# Altium footprint library DT10966_MOTOR_CONTROLLER.PcbLib: 58 footprints (part 1 of 4)
Each footprint in its own frame and in the unit in brackets; x right, y up, seen from the top. Pads: shape width x height; smd on the part's side, far side on the other; paste and mask are expansions set on the pad; w line width, h text height; cw(c..) or ccw(c..) is an arc to the next point about the centre after c.
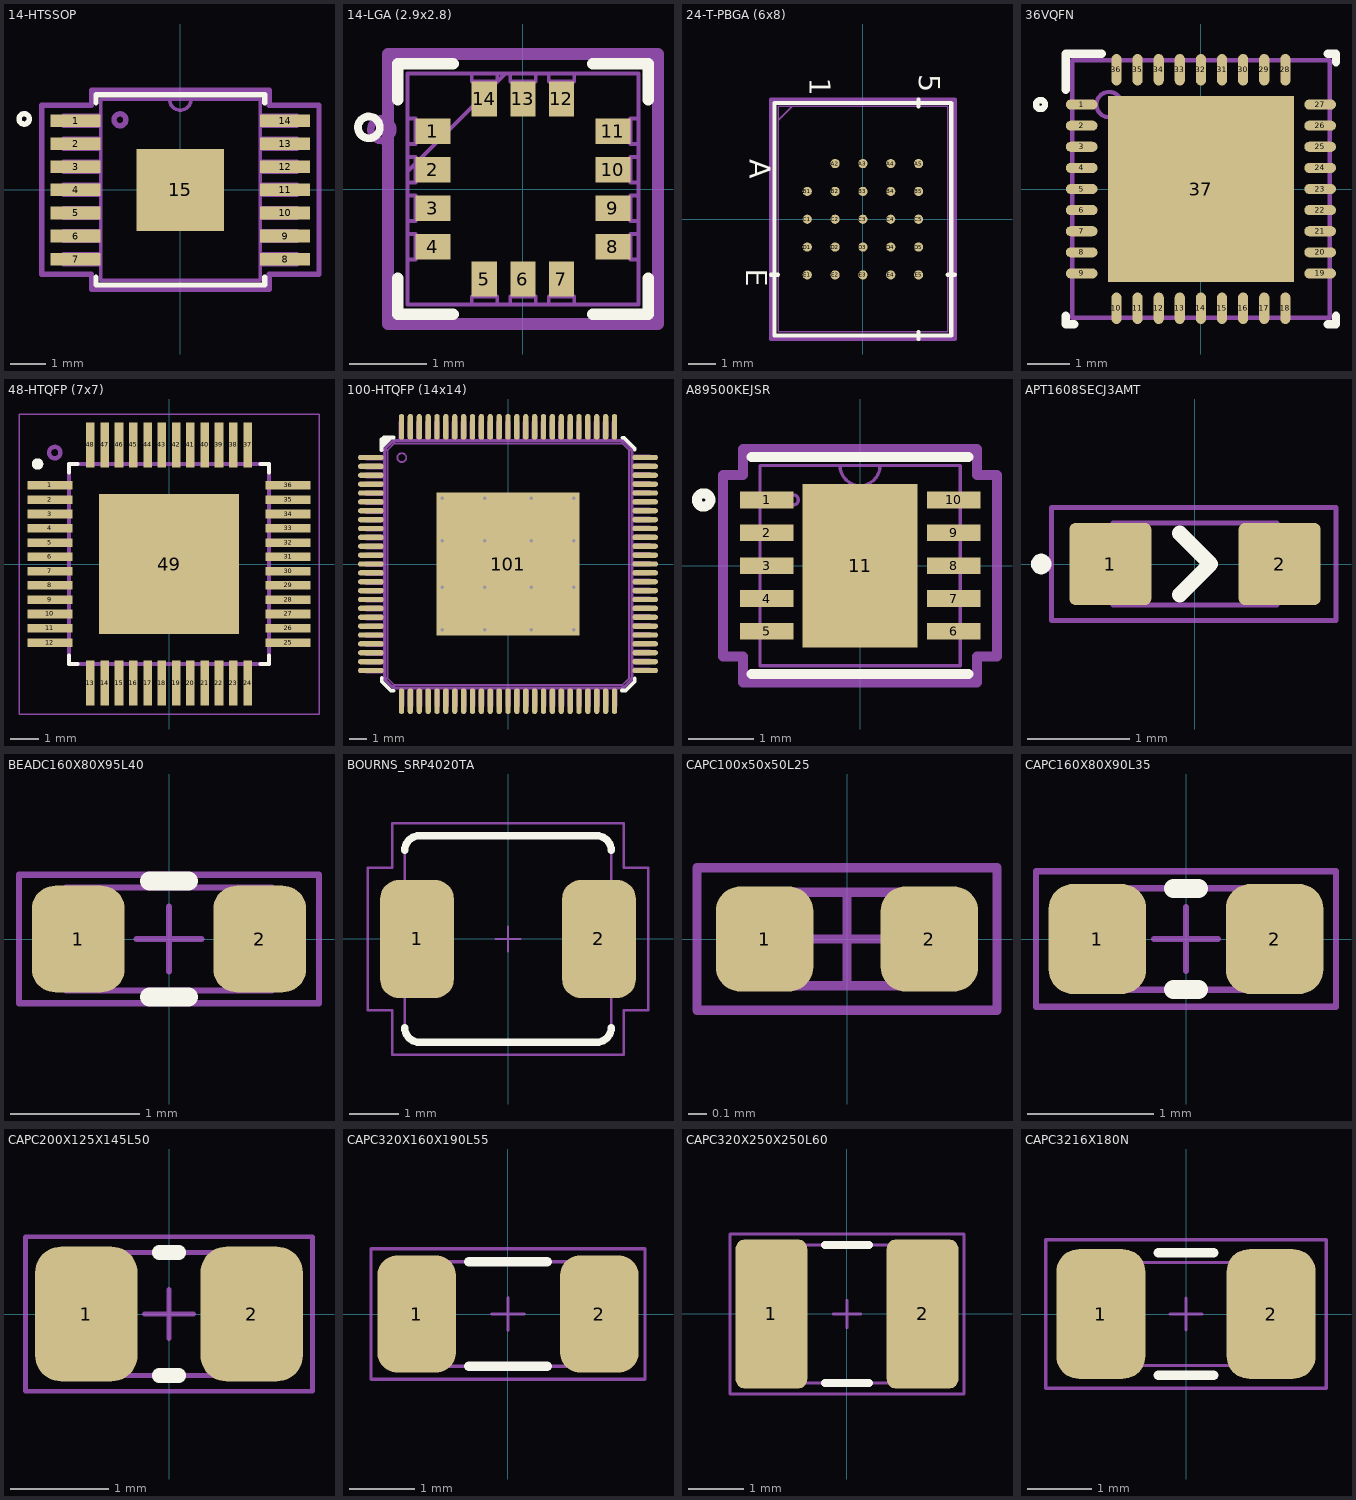
[diagram p0: the footprints below, top view; thin cyan lines are the x and y axes]

## 14-HTSSOP [mil]
pads (15):
  rect 55.42x14 smd paste+0 mask+1.97: 1(-116.21,76.77) 2(-116.21,51.18) 3(-116.21,25.59) 4(-116.21,0) 5(-116.21,-25.59) 6(-116.21,-51.18) 7(-116.21,-76.77) 8(116.21,-76.77) 9(116.21,-51.18) 10(116.21,-25.59) 11(116.21,0) 12(116.21,25.59) 13(116.21,51.18) 14(116.21,76.77)
  rect 97x91 smd paste+0 mask+1.97: 15(0,0)
Top Overlay:
  circle w5.91: c-173.23,78.74 r5.74
  lines w6: -93.5,-96.87 -93.5,-105.5 93.5,-105.5 93.5,-96.87 ; -93.5,96.87 -93.5,105.5 93.5,105.5 93.5,96.87
Top Assembly:
  circle w5.91: c-66.93,77.76 r6.6
  lines w3.94: -12,100.5 ccw(c0,100.5) 12,100.5 ; -129.92,-82.77 -88.5,-82.77 -88.5,-70.77 -129.92,-70.77 -129.92,-82.77 ; -129.92,-57.18 -88.5,-57.18 -88.5,-45.18 -129.92,-45.18 -129.92,-57.18 ; -129.92,-31.59 -88.5,-31.59 -88.5,-19.59 -129.92,-19.59 -129.92,-31.59 ; -129.92,-6 -88.5,-6 -88.5,6 -129.92,6 -129.92,-6 ; -129.92,19.59 -129.92,31.59 -88.5,31.59 -88.5,19.59 -129.92,19.59 ; -129.92,45.18 -88.5,45.18 -88.5,57.18 -129.92,57.18 -129.92,45.18 ; -129.92,70.77 -88.5,70.77 -88.5,82.77 -129.92,82.77 -129.92,70.77 ; -88.5,-100.5 88.5,-100.5 88.5,100.5 -88.5,100.5 -88.5,-100.5 ; 88.5,-82.77 129.92,-82.77 129.92,-70.77 88.5,-70.77 88.5,-82.77 ; 88.5,-57.18 129.92,-57.18 129.92,-45.18 88.5,-45.18 88.5,-57.18 ; 88.5,-31.59 129.92,-31.59 129.92,-19.59 88.5,-19.59 88.5,-31.59 ; 88.5,-6 129.92,-6 129.92,6 88.5,6 88.5,-6 ; 88.5,19.59 129.92,19.59 129.92,31.59 88.5,31.59 88.5,19.59 ; 88.5,45.18 129.92,45.18 129.92,57.18 88.5,57.18 88.5,45.18 ; 88.5,70.77 129.92,70.77 129.92,82.77 88.5,82.77 88.5,70.77
Top Courtyard:
  lines w6: -153.92,-93.77 -98.5,-93.77 -98.5,-110.5 98.5,-110.5 98.5,-93.77 153.92,-93.77 153.92,93.77 98.5,93.77 98.5,110.5 -98.5,110.5 -98.5,93.77 -153.92,93.77 -153.92,-93.77
3D body "ALM2403QPWPRQ1_TEX.step": height 47.09, standoff -2.01, extent -129.92,-100.51 129.92,100.51

## 14-LGA (2.9x2.8) [mil] "ADXL382-2BCCZ-RL7"
height 21.65
pads (14):
  rect 18x13 smd paste+0 mask+0: 1(-46,29.53) 2(-46,9.84) 3(-46,-9.84) 4(-46,-29.53) 8(46,-29.53) 9(46,-9.84) 10(46,9.84) 11(46,29.53)
  rect 13x18 smd paste+0 mask+0: 5(-19.68,-46) 6(0,-46) 7(19.68,-46) 12(19.68,46) 13(0,46) 14(-19.68,46)
Top Overlay:
  circle w3.94: c-78.74,31.5 r5.57
  lines w6: -64,-45.55 -64,-64 -35.7,-64 ; -64,45.55 -64,64 -35.7,64 ; 35.7,-64 64,-64 64,-45.55 ; 35.7,64 64,64 64,45.55
Top Solder:
  rectangle: -56.75,-38.24 -35.04,38.33
  region: 56.75,38.17 35.04,38.17 35.04,-38.24 56.75,-38.24
  rectangle: -28.58,35.12 28.63,56.95
  rectangle: -28.58,-56.95 28.63,-35.12
Top Assembly:
  circle w3.94: c-72.2,30.38 r5.57
  lines w1.97: -59,9 -9,59 ; -59,-59 -59,59 59,59 59,-59 -59,-59 ; -59,-36.03 -55,-36.03 -55,-23.03 -59,-23.03 -59,-36.03 ; -59,-16.34 -55,-16.34 -55,-3.34 -59,-3.34 -59,-16.34 ; -59,3.34 -55,3.34 -55,16.34 -59,16.34 -59,3.34 ; -59,23.03 -55,23.03 -55,36.03 -59,36.03 -59,23.03 ; -26.18,-59 -13.19,-59 -13.19,-55 -26.18,-55 -26.18,-59 ; -26.18,55 -13.19,55 -13.19,59 -26.18,59 -26.18,55 ; -6.5,-59 6.5,-59 6.5,-55 -6.5,-55 -6.5,-59 ; -6.5,55 6.5,55 6.5,59 -6.5,59 -6.5,55 ; 13.19,-59 26.18,-59 26.18,-55 13.19,-55 13.19,-59 ; 13.19,55 26.18,55 26.18,59 13.19,59 13.19,55 ; 55,-36.03 59,-36.03 59,-23.03 55,-23.03 55,-36.03 ; 55,-16.34 59,-16.34 59,-3.34 55,-3.34 55,-16.34 ; 55,3.34 59,3.34 59,16.34 55,16.34 55,3.34 ; 55,23.03 59,23.03 59,36.03 55,36.03 55,23.03
  text "'.Designator'" at -145.67,74.26 h60
Top Courtyard:
  lines w6: -69,-69 -69,-46.03 -69,46.03 -69,69 -36.19,69 36.19,69 69,69 69,46.03 69,-46.03 69,-69 36.19,-69 -36.19,-69 -69,-69
3D body "CC-14-3_ADI.step": height 38.11, standoff 0, extent -59.02,-59.02 59.02,59.02

## 24-T-PBGA (6x8) [mil]
height 21.65
pads (24):
  round 13 smd paste+0 mask+1.97: A2(-39.37,78.74) A3(0,78.74) A4(39.37,78.74) A5(78.74,78.74) B1(-78.74,39.37) B2(-39.37,39.37) B3(0,39.37) B4(39.37,39.37) B5(78.74,39.37) C1(-78.74,0) C2(-39.37,0) C3(0,0) C4(39.37,0) C5(78.74,0) D1(-78.74,-39.37) D2(-39.37,-39.37) D3(0,-39.37) D4(39.37,-39.37) D5(78.74,-39.37) E1(-78.74,-78.74) E2(-39.37,-78.74) E3(0,-78.74) E4(39.37,-78.74) E5(78.74,-78.74)
Top Overlay:
  lines w6: -130,-78.74 -120,-78.74 ; 78.74,-169.5 78.74,-159.5 ; 78.74,159.5 78.74,169.5 ; 120,-78.74 130,-78.74 ; -125,-164.5 -125,164.5 125,164.5 125,-164.5 -125,-164.5
  text "5" at 70,205 h50
  text "1" at -85,200 h50
  text "E" at -175,-70 h50
  text "A" at -170,85 h50
Top Assembly:
  lines w1.97: -120,139.81 -100.31,159.5 ; -120,-159.5 -120,159.5 120,159.5 120,-159.5 -120,-159.5
  text "'.Designator'" at -145.67,11.27 h60
  text "5" at 103.74,184.5 h50
  text "1" at -53.74,184.5 h50
  text "E" at -170,-103.74 h50
  text "A" at -170,53.74 h50
Top Courtyard:
  lines w6: -130,-169.5 130,-169.5 130,169.5 -130,169.5 -130,-169.5
3D body "BGA24_MT25QL_MRN.step": height 47.09, standoff -0.01, extent -120,-159.49 120,159.49

## 36VQFN [mm] "PGA900ARHHR"
height 0.55
pads (37):
  oval 0.75x0.24 smd paste+0 mask+0.051: 1(-2.825,2) 2(-2.825,1.5) 3(-2.825,1) 4(-2.825,0.5) 5(-2.825,0) 6(-2.825,-0.5) 7(-2.825,-1) 8(-2.825,-1.5) 9(-2.825,-2) 19(2.825,-2) 20(2.825,-1.5) 21(2.825,-1) 22(2.825,-0.5) 23(2.825,0) 24(2.825,0.5) 25(2.825,1) 26(2.825,1.5) 27(2.825,2)
  oval 0.24x0.75 smd paste+0 mask+0.051: 10(-2,-2.825) 11(-1.5,-2.825) 12(-1,-2.825) 13(-0.5,-2.825) 14(0,-2.825) 15(0.5,-2.825) 16(1,-2.825) 17(1.5,-2.825) 18(2,-2.825) 28(2,2.825) 29(1.5,2.825) 30(1,2.825) 31(0.5,2.825) 32(0,2.825) 33(-0.5,2.825) 34(-1,2.825) 35(-1.5,2.825) 36(-2,2.825)
  rect 4.4x4.4 smd paste-2.187 mask+0.051: 37(0,0)
Top Overlay:
  circle w0.15: c-3.8,2 r0.107
  lines w0.2: -3.2,-3 -3.2,-3.2 -3,-3.2 ; -3.2,2.35 -3.2,3.2 -2.35,3.2 ; 3,-3.2 3.2,-3.2 3.2,-3 ; 3,3.2 3.2,3.2 3.2,3
Top Paste:
  region: 0.1,1.946 0.1,0.1 1.946,0.1 1.946,1.946
  region: -0.1,0.1 -0.1,1.946 -1.946,1.946 -1.946,0.1
  region: -0.1,-1.946 -0.1,-0.1 -1.946,-0.1 -1.946,-1.946
  region: 0.1,-0.1 0.1,-1.946 1.946,-1.946 1.946,-0.1
Top Assembly:
  circle w0.1: c-2.175,2 r0.3
  lines w0.1: -3.05,-3.05 3.05,-3.05 3.05,3.05 -3.05,3.05 -3.05,-3.05
  text "'.Designator'" at -3.7,3.386 h1.52
3D body "RHH0036C.stp": height 1, standoff 0, extent -3,-3 3,3

## 48-HTQFP (7x7) [mm]
pads (49):
  rect 1.57x0.3 smd: 1(-4.17,2.75) 2(-4.17,2.25) 3(-4.17,1.75) 4(-4.17,1.25) 5(-4.17,0.75) 6(-4.17,0.25) 7(-4.17,-0.25) 8(-4.17,-0.75) 9(-4.17,-1.25) 10(-4.17,-1.75) 11(-4.17,-2.25) 12(-4.17,-2.75) 25(4.17,-2.75) 26(4.17,-2.25) 27(4.17,-1.75) 28(4.17,-1.25) 29(4.17,-0.75) 30(4.17,-0.25) 31(4.17,0.25) 32(4.17,0.75) 33(4.17,1.25) 34(4.17,1.75) 35(4.17,2.25) 36(4.17,2.75)
  rect 0.3x1.57 smd: 13(-2.75,-4.17) 14(-2.25,-4.17) 15(-1.75,-4.17) 16(-1.25,-4.17) 17(-0.75,-4.17) 18(-0.25,-4.17) 19(0.25,-4.17) 20(0.75,-4.17) 21(1.25,-4.17) 22(1.75,-4.17) 23(2.25,-4.17) 24(2.75,-4.17) 37(2.75,4.17) 38(2.25,4.17) 39(1.75,4.17) 40(1.25,4.17) 41(0.75,4.17) 42(0.25,4.17) 43(-0.25,4.17) 44(-0.75,4.17) 45(-1.25,4.17) 46(-1.75,4.17) 47(-2.25,4.17) 48(-2.75,4.17)
  rect 4.902x4.902 smd paste-5 mask+0.05: 49(0,0)
Top Overlay:
  circle w0.2: c-4.6,3.5 r0.1
  lines w0.127: -3.5,-3.2 -3.5,-3.5 -3.2,-3.5 ; -3.5,3.2 -3.5,3.5 -3.2,3.5 ; 3.2,-3.5 3.5,-3.5 3.5,-3.2 ; 3.2,3.5 3.5,3.5 3.5,3.2
Top Paste:
  region: 0.101,0.101 0.101,2.45 2.45,2.45 2.45,0.101
  region: 0.101,-0.101 2.45,-0.101 2.45,-2.45 0.101,-2.45
  region: -0.101,-0.101 -0.101,-2.45 -2.45,-2.45 -2.45,-0.101
  region: -0.101,0.101 -2.45,0.101 -2.45,2.45 -0.101,2.45
Top Assembly:
  circle w0.15: c-4,3.9 r0.2
  lines w0.127: -3.5,-3.5 -3.5,3.5 3.5,3.5 3.5,-3.5 -3.5,-3.5
  text "'.Designator'" at -3.4,2.286 h1.52
Top Courtyard:
  lines w0.05: -5.25,-5.25 -5.25,5.25 5.25,5.25 5.25,-5.25 -5.25,-5.25
3D body "TUSB8020BIPHPR.STEP": height 1.2, standoff 0, extent -4.5,-4.5 4.5,4.5

## 100-HTQFP (14x14) [mm]
height 0.55
pads (101):
  oval 1.45x0.3 smd paste+0 mask+0.051: 1(-7.725,6) 2(-7.725,5.5) 3(-7.725,5) 4(-7.725,4.5) 5(-7.725,4) 6(-7.725,3.5) 7(-7.725,3) 8(-7.725,2.5) 9(-7.725,2) 10(-7.725,1.5) 11(-7.725,1) 12(-7.725,0.5) 13(-7.725,0) 14(-7.725,-0.5) 15(-7.725,-1) 16(-7.725,-1.5) 17(-7.725,-2) 18(-7.725,-2.5) 19(-7.725,-3) 20(-7.725,-3.5) 21(-7.725,-4) 22(-7.725,-4.5) 23(-7.725,-5) 24(-7.725,-5.5) 25(-7.725,-6) 51(7.725,-6) 52(7.725,-5.5) 53(7.725,-5) 54(7.725,-4.5) 55(7.725,-4) 56(7.725,-3.5) 57(7.725,-3) 58(7.725,-2.5) 59(7.725,-2) 60(7.725,-1.5) 61(7.725,-1) 62(7.725,-0.5) 63(7.725,0) 64(7.725,0.5) 65(7.725,1) 66(7.725,1.5) 67(7.725,2) 68(7.725,2.5) 69(7.725,3) 70(7.725,3.5) 71(7.725,4) 72(7.725,4.5) 73(7.725,5) 74(7.725,5.5) 75(7.725,6)
  oval 0.3x1.45 smd paste+0 mask+0.051: 26(-6,-7.725) 27(-5.5,-7.725) 28(-5,-7.725) 29(-4.5,-7.725) 30(-4,-7.725) 31(-3.5,-7.725) 32(-3,-7.725) 33(-2.5,-7.725) 34(-2,-7.725) 35(-1.5,-7.725) 36(-1,-7.725) 37(-0.5,-7.725) 38(0,-7.725) 39(0.5,-7.725) 40(1,-7.725) 41(1.5,-7.725) 42(2,-7.725) 43(2.5,-7.725) 44(3,-7.725) 45(3.5,-7.725) 46(4,-7.725) 47(4.5,-7.725) 48(5,-7.725) 49(5.5,-7.725) 50(6,-7.725) 76(6,7.725) 77(5.5,7.725) 78(5,7.725) 79(4.5,7.725) 80(4,7.725) 81(3.5,7.725) 82(3,7.725) 83(2.5,7.725) 84(2,7.725) 85(1.5,7.725) 86(1,7.725) 87(0.5,7.725) 88(0,7.725) 89(-0.5,7.725) 90(-1,7.725) 91(-1.5,7.725) 92(-2,7.725) 93(-2.5,7.725) 94(-3,7.725) 95(-3.5,7.725) 96(-4,7.725) 97(-4.5,7.725) 98(-5,7.725) 99(-5.5,7.725) 100(-6,7.725)
  rect 8.045x8.045 smd paste-10 mask+0.051: 101(0,0)
via 3.7,-3.7 diameter 0.4 hole 0.2
via 1.3,-3.7 diameter 0.4 hole 0.2
via -1.3,-3.7 diameter 0.4 hole 0.2
via -3.7,-3.7 diameter 0.4 hole 0.2
via 3.7,-1.3 diameter 0.4 hole 0.2
via 1.3,-1.3 diameter 0.4 hole 0.2
via -1.3,-1.3 diameter 0.4 hole 0.2
via -3.7,-1.3 diameter 0.4 hole 0.2
via -3.7,1.3 diameter 0.4 hole 0.2
via -1.3,1.3 diameter 0.4 hole 0.2
via 1.3,1.3 diameter 0.4 hole 0.2
via 3.7,1.3 diameter 0.4 hole 0.2
via 3.7,3.7 diameter 0.4 hole 0.2
via 1.3,3.7 diameter 0.4 hole 0.2
via -1.3,3.7 diameter 0.4 hole 0.2
via -3.7,3.7 diameter 0.4 hole 0.2
Top Overlay:
  lines w0.2: -7.125,6.4 -7.125,6.575 -6.6,7.1 ; -7.125,6.525 -7.125,6.8 -6.8,7.125 ; -7.125,6.675 -7.125,6.925 -7.125,7.025 -7,7.125 -6.8,7.125 ; -7.1,-6.625 -6.575,-7.15 -6.425,-7.15 ; -7.1,-6.6 -7.1,-6.4 ; -6.575,7.1 -6.425,7.1 ; -6.45,7.125 -6.8,7.125 ; 6.4,-7.125 6.6,-7.125 ; 6.425,7.1 6.55,7.1 7.15,6.5 7.15,6.425 ; 6.625,-7.125 7.15,-6.6 7.15,-6.425
Top Paste:
  region: -1.9,-0.2 -0.2,-0.2 -0.2,-1.9 -1.9,-1.9
  region: -1.9,1.9 -0.2,1.9 -0.2,0.2 -1.9,0.2
  region: 0.2,-0.2 1.9,-0.2 1.9,-1.9 0.2,-1.9
  region: 0.2,1.9 1.9,1.9 1.9,0.2 0.2,0.2
  region: 2.3,-0.2 4,-0.2 4,-1.9 2.3,-1.9
  region: 2.3,1.9 4,1.9 4,0.2 2.3,0.2
  region: 2.3,-4 2.3,-2.3 4,-2.3 4,-4
  region: 0.2,-4 0.2,-2.3 1.9,-2.3 1.9,-4
  region: -1.9,-4 -1.9,-2.3 -0.2,-2.3 -0.2,-4
  region: 2.3,2.3 2.3,4 4,4 4,2.3
  region: 0.2,2.3 0.2,4 1.9,4 1.9,2.3
  region: -1.9,2.3 -1.9,4 -0.2,4 -0.2,2.3
  region: -4,-2.3 -2.3,-2.3 -2.3,-4 -4,-4
  region: -4,-0.2 -2.3,-0.2 -2.3,-1.9 -4,-1.9
  region: -4,1.9 -2.3,1.9 -2.3,0.2 -4,0.2
  region: -4,4 -2.3,4 -2.3,2.3 -4,2.3
Top Assembly:
  drawing of 2400 lines, arcs and shapes, not listed
  text "'.Designator'" at -3.7,-0.214 h1.52
3D body "PZP0100N.stp": height 1.1, standoff 0, extent -8.015,-8.015 8.015,8.015

## A89500KEJSR [mil]
height 21.65
pads (11):
  rect 32x10 smd paste+0 mask+0: 1(-56,39.37) 2(-56,19.68) 3(-56,0) 4(-56,-19.68) 5(-56,-39.37) 6(56,-39.37) 7(56,-19.68) 8(56,0) 9(56,19.68) 10(56,39.37)
  rect 69x98 smd paste+0 mask+0: 11(0,0)
Top Overlay:
  circle w6: c-93.69,39.37 r4
  lines w6: -65,-65 65,-65 ; -65,65 65,65
Top Solder:
  rectangle: -35.94,-50.98 36.52,50.79
  region: 73.98,-32.35 30,-32.35 30,-46.21 73.98,-46.21
  region: 73.98,-12.67 30,-12.67 30,-26.53 73.98,-26.53
  region: 73.98,7.02 30,7.02 30,-6.84 73.98,-6.84
  region: 73.98,26.7 30,26.7 30,12.84 73.98,12.84
  region: 73.98,46.39 30,46.39 30,32.53 73.98,32.53
  rectangle: -73.98,-46.21 -30,-32.35
  rectangle: -73.98,-26.53 -30,-12.67
  rectangle: -73.98,-6.84 -30,7.02
  rectangle: -73.98,12.84 -30,26.7
  rectangle: -73.98,32.53 -30,46.39
Top Assembly:
  circle w1.97: c-40,39.37 r3
  lines w1.97: -12,60 ccw(c0,60) 12,60 ; -60,-60 60,-60 60,60 -60,60 -60,-60
  text "'.Designator'" at -145.67,11.27 h60
Top Courtyard:
  lines w6: -82,-54.37 -82,54.37 -70,54.37 -70,70 70,70 70,54.37 82,54.37 82,-54.37 70,-54.37 70,-70 -70,-70 -70,-54.37 -82,-54.37
3D body "SON10_A89500GEJTR-T_ALM.step": height 32.09, standoff 0, extent -60,-60 60,60

## APT1608SECJ3AMT [mm]
height 0.55
pads (2):
  rrect15% 0.8x0.8 smd: 1(-0.825,0) 2(0.825,0)
Top Overlay:
  circle w0.1: c-1.5,0 r0.05
  lines w0.1: 0.175,0 0.175,0
  lines w0.15: -0.15,-0.3 0.15,0 -0.15,0.3
Top Assembly:
  lines w0.05: -0.8,-0.4 -0.8,0.4 0.8,0.4 0.8,-0.4 -0.8,-0.4
  text "'.Designator'" at -2.317,0.613 h1
Top Courtyard:
  lines w0.05: -1.4,-0.55 -1.4,0.55 1.375,0.55 1.375,-0.55 -1.4,-0.55
3D body "APT1608SEC_J3-AMT.stp": height 0.75, standoff 0, extent -0.801,-0.4 0.81,0.4

## BEADC160X80X95L40 [mm] "EIA 0603 (1608) 1.60x0.80x0.95 Ferrite Bead"
height 0.95
pads (2):
  rrect50% 0.72x0.83 smd: 1(-0.705,0) 2(0.705,0)
Top Overlay:
  lines w0.15: -0.15,-0.45 0.15,-0.45 ; -0.15,0.45 0.15,0.45
Top Assembly:
  lines w0.05: -0.8,-0.4 0.8,-0.4 0.8,0.4 -0.8,0.4 -0.8,-0.4
  text "'.Designator'" at -2.417,-0.226 h1
Top Courtyard:
  lines w0.05: -0.25,0 0.25,0 ; 0,-0.25 0,0.25 ; -1.165,-0.5 -1.165,0 -1.165,0.5 0,0.5 1.165,0.5 1.165,0 1.165,-0.5 0,-0.5 -1.165,-0.5
3D body "BLM18AG102SN1D.STEP": height 0.95, standoff 0, extent -0.8,-0.4 0.8,0.4

## BOURNS_SRP4020TA [mm] "Inductor 4.45x4.06 h2.00 Bourns Inc."
height 2
pads (2):
  rrect50% 1.5x2.4 smd paste-1: 1(-1.85,0) 2(1.85,0)
Top Overlay:
  lines w0.15: -2.1,-1.8 ccw(c-1.8,-1.8) -1.8,-2.1 1.8,-2.1 ccw(c1.8,-1.8) 2.1,-1.8 ; -2.1,1.8 cw(c-1.8,1.8) -1.8,2.1 1.8,2.1 cw(c1.8,1.8) 2.1,1.8
Top Paste:
  drawing of 4 lines, arcs and shapes, not listed
Top Assembly:
  lines w0.05: -2.1,-1 -2.2,-1 -2.2,-0.059 ; -2.1,-0.059 -2.2,-0.059 ; -2.1,0.329 -2.2,0.329 ; -2.1,1 -2.2,1 -2.2,0.329 ; 2.1,-1 2.2,-1 2.2,-0.059 ; 2.1,-0.059 2.2,-0.059 ; 2.1,0.329 2.2,0.329 ; 2.1,1 2.2,1 2.2,0.329 ; -2.2,-0.059 -2.2,0.329 ; 2.2,-0.059 2.2,0.329 ; -2.1,-1.8 ccw(c-1.8,-1.8) -1.8,-2.1 1.8,-2.1 ccw(c1.8,-1.8) 2.1,-1.8 2.1,1.8 ccw(c1.8,1.8) 1.8,2.1 -1.8,2.1 ccw(c-1.8,1.8) -2.1,1.8 -2.1,-1.8
  text "'.Designator'" at -2.417,-0.226 h1
Top Courtyard:
  lines w0.05: -0.25,0 0.25,0 ; 0,-0.25 0,0.25 ; -2.85,-1.45 -2.35,-1.45 -2.35,-2.35 0,-2.35 2.35,-2.35 2.35,-1.45 2.85,-1.45 2.85,0 2.85,1.45 2.35,1.45 2.35,2.35 0,2.35 -2.35,2.35 -2.35,1.45 -2.85,1.45 -2.85,0 -2.85,-1.45
3D body "SRP4020TA series.stp": height 1.91, standoff 0.01, extent -2.2,-2.1 2.2,2.1

## CAPC100x50x50L25 [mm] "EIA 0402 (1005) T0.50 1.00x0.50x0.50"
height 0.5
pads (2):
  rrect50% 0.52x0.56 smd: 1(-0.44,0) 2(0.44,0)
Top Assembly:
  rectangle: -0.5,-0.25 -0.25,0.25
  rectangle: 0.25,-0.25 0.5,0.25
  lines w0.05: -0.25,-0.25 -0.25,0.25 ; 0.25,-0.25 0.25,0.25 ; 0.5,0.25 0.5,-0.25 -0.5,-0.25 -0.5,0.25 0.5,0.25 ; 0.5,0.25 0.5,0.25
  text "'.Designator'" at -2.417,0.438 h1
Top Courtyard:
  lines w0.05: -0.25,0 0.25,0 ; 0,-0.25 0,0.25 ; -0.8,-0.38 -0.8,0.38 0.8,0.38 0.8,-0.38 -0.8,-0.38
3D body "CAP_0402_h0.5_C0402C104K4RACTU.step": height 0.55, standoff 0, extent -0.525,-0.275 0.525,0.275

## CAPC160X80X90L35 [mm] "EIA 0603 (1608) T0.90 1.60x0.80x0.90"
height 0.9
pads (2):
  rrect50% 0.77x0.87 smd: 1(-0.7,0) 2(0.7,0)
Top Overlay:
  lines w0.15: -0.1,-0.4 0.1,-0.4 ; -0.1,0.4 0.1,0.4
Top Assembly:
  rectangle: -0.8,-0.4 -0.45,0.4
  region: 0.8,0.4 0.45,0.4 0.45,-0.4 0.8,-0.4
  lines w0.05: -0.45,-0.4 -0.45,0.4 ; 0.45,-0.4 0.45,0.4 ; -0.8,-0.4 0.8,-0.4 0.8,0.4 -0.8,0.4 -0.8,-0.4
  text "'.Designator'" at -2.417,0.588 h1
Top Courtyard:
  lines w0.05: -0.25,0 0.25,0 ; 0,-0.25 0,0.25 ; -1.185,-0.535 -1.185,0.535 1.185,0.535 1.185,-0.535 -1.185,-0.535
3D body "CAP_0603_h0.9_C0603C105K4RACTU.step": height 0.9, standoff 0, extent -0.875,-0.475 0.875,0.475

## CAPC200X125X145L50 [mm] "EIA 0805 (2012) T1.45 2.00x1.25x1.45"
height 1.45
pads (2):
  rrect50% 1.04x1.37 smd: 1(-0.84,0) 2(0.84,0)
Top Overlay:
  lines w0.15: -0.1,-0.625 0.1,-0.625 ; -0.1,0.625 0.1,0.625
Top Assembly:
  rectangle: -1,-0.625 -0.6,0.625
  region: 1,0.625 0.6,0.625 0.6,-0.625 1,-0.625
  lines w0.05: -0.6,-0.625 -0.6,0.625 ; 0.6,-0.625 0.6,0.625 ; -1,-0.625 1,-0.625 1,0.625 -1,0.625 -1,-0.625
  text "'.Designator'" at -2.417,0.813 h1
Top Courtyard:
  lines w0.05: -0.25,0 0.25,0 ; 0,-0.25 0,0.25 ; -1.46,-0.785 1.46,-0.785 1.46,0.785 -1.46,0.785 -1.46,-0.785
3D body "GCJ21BR71A106KE01L.STEP": height 1.45, standoff 0, extent -1,-0.625 1,0.625

## CAPC320X160X190L55 [mm] "EIA 1206 (3216) T1.90 3.20x1.60x1.90"
height 1.9
pads (2):
  rrect50% 1.2x1.8 smd: 1(-1.4,0) 2(1.4,0)
Top Overlay:
  lines w0.15: -0.6,-0.8 0.6,-0.8 ; -0.6,0.8 0.6,0.8
Top Assembly:
  region: 1.599,0.8 1.049,0.8 1.049,-0.8 1.599,-0.8
  rectangle: -1.601,-0.8 -1.051,0.8
  lines w0.05: -1.6,-0.8 -1.6,0.8 1.6,0.8 1.6,-0.8 -1.6,-0.8
  text "'.Designator'" at -2.417,-0.226 h1
Top Courtyard:
  lines w0.05: -0.25,0 0.25,0 ; 0,-0.25 0,0.25 ; -2.1,-1 -2.1,1 2.1,1 2.1,-1 -2.1,-1
3D body "CAPC320X160X190L60.step": height 1.8, standoff 0, extent -1.676,-0.876 1.676,0.876

## CAPC320X250X250L60 [mm] "EIA 1210 (3225) T2.50 3.20x2.50x2.50"
height 2.5
pads (2):
  rrect25% 1.3x2.7 smd paste-2539.97: 1(-1.37,0) 2(1.37,0)
Top Overlay:
  lines w0.15: -0.4,-1.25 0.4,-1.25 ; -0.4,1.25 0.4,1.25
Top Paste:
  drawing of 4 lines, arcs and shapes, not listed
Top Assembly:
  region: -1.6,1.25 -1,1.25 -1,-1.25 -1.6,-1.25
  region: 1.6,-1.25 1,-1.25 1,1.25 1.6,1.25
  lines w0.05: -1,-1.25 -1,1.25 ; 1,-1.25 1,1.25 ; -1.6,-1.25 -1.6,1.25 1.6,1.25 1.6,-1.25 -1.6,-1.25
  text "'.Designator'" at -2.417,-0.226 h1
Top Courtyard:
  lines w0.05: -0.25,0 0.25,0 ; 0,-0.25 0,0.25 ; -2.12,-1.45 -2.12,1.45 2.12,1.45 2.12,-1.45 -2.12,-1.45
3D body "CAPC320X250X250L60.step": height 2.8, standoff 0, extent -1.6,-1.25 1.6,1.25

## CAPC3216X180N [mm]
height 0.55
pads (2):
  rrect50% 1.38x2.01 smd: 1(-1.32,0) 2(1.32,0)
Top Overlay:
  lines w0.15: -0.425,-0.95 0.425,-0.95 ; -0.425,0.95 0.425,0.95
Top Assembly:
  region: 1.6,0.8 1.05,0.8 1.05,-0.8 1.6,-0.8
  rectangle: -1.6,-0.8 -1.05,0.8
  lines w0.05: -1.6,-0.8 -1.6,0.8 1.6,0.8 1.6,-0.8 -1.6,-0.8
  text "'.Designator'" at -2.417,0.988 h1
Top Courtyard:
  lines w0.05: -0.25,0 0.25,0 ; 0,-0.25 0,0.25 ; -2.175,-1.15 -2.175,1.15 2.175,1.15 2.175,-1.15 -2.175,-1.15
3D body "GCJ31CL8EL105KA07L.stp": height 1.8, standoff 0, extent -1.6,-0.8 1.6,0.8